# Altium footprint library EEE-FK0J331P.PcbLib: 3 footprints
Each footprint in its own frame and in the unit in brackets; x right, y up, seen from the top. Pads: shape width x height; smd on the part's side, far side on the other; paste and mask are expansions set on the pad; w line width, h text height; cw(c..) or ccw(c..) is an arc to the next point about the centre after c.
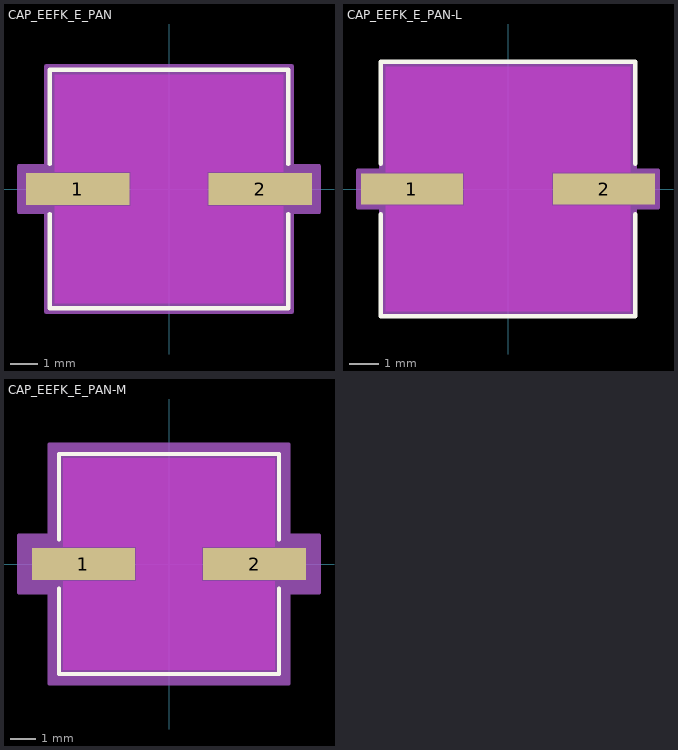
[diagram p0: the footprints below, top view; thin cyan lines are the x and y axes]

## CAP_EEFK_E_PAN [mil]
pads (2):
  rect 150x46 smd paste+0 mask+0: 1(-132,0) 2(132,0)
Top Layer keep-out:
  region: -165.5,-165.5 -165.5,-25 165.5,-25 165.5,-165.5
  region: -165.5,25 -165.5,165.5 165.5,165.5 165.5,25
  region: -55,-25 -55,25 55,25 55,-25
Top Overlay:
  lines w6: -172.5,-36.1 -172.5,-172.5 172.5,-172.5 172.5,-36.1 ; -172.5,36.1 -172.5,172.5 172.5,172.5 172.5,36.1
Keep-Out Layer:
  region: -55,-25 -55,25 55,25 55,-25
Mechanical 13:
  lines w1: -167.5,-83.75 -83.75,-167.5 ; -167.5,83.75 -83.75,167.5 ; -167.5,-167.5 -167.5,167.5 167.5,167.5 167.5,-167.5 -167.5,-167.5
Mechanical 15:
  region: -177.5,-33 -217,-33 -217,33 -177.5,33 -177.5,177.5 177.5,177.5 177.5,33 217,33 217,-33 177.5,-33 177.5,-177.5 -177.5,-177.5
  lines w6: -217,-33 -177.5,-33 -177.5,-177.5 177.5,-177.5 177.5,-33 217,-33 217,33 177.5,33 177.5,177.5 -177.5,177.5 -177.5,33 -217,33 -217,-33
3D body "CAP_EEFK_E_PAN.step": height 258.11, standoff 0, extent -187.01,-167.48 187.01,167.48

## CAP_EEFK_E_PAN-L [mil]
pads (2):
  rect 138x42 smd paste+0 mask+0: 1(-130,0) 2(130,0)
Top Layer keep-out:
  region: -59,-23 -59,23 59,23 59,-23
  region: -165.5,23 -165.5,165.5 165.5,165.5 165.5,23
  region: -165.5,-165.5 -165.5,-23 165.5,-23 165.5,-165.5
Top Overlay:
  lines w6: -172.5,-34.1 -172.5,-172.5 172.5,-172.5 172.5,-34.1 ; -172.5,34.1 -172.5,172.5 172.5,172.5 172.5,34.1
  text ".Designator" at -137.5,-25 h50
Keep-Out Layer:
  region: -59,-23 -59,23 59,23 59,-23
Mechanical 13:
  lines w1: -167.5,-83.75 -83.75,-167.5 ; -167.5,83.75 -83.75,167.5 ; -167.5,-167.5 167.5,-167.5 167.5,167.5 -167.5,167.5 -167.5,-167.5
  text ".Designator" at -137.5,-25 h50
Mechanical 15:
  region: -171.5,-25 -203,-25 -203,25 -171.5,25 -171.5,171.5 171.5,171.5 171.5,25 203,25 203,-25 171.5,-25 171.5,-171.5 -171.5,-171.5
  lines w6: -203,-25 -203,25 -171.5,25 -171.5,171.5 171.5,171.5 171.5,25 203,25 203,-25 171.5,-25 171.5,-171.5 -171.5,-171.5 -171.5,-25 -203,-25
3D body "CAP_EEFK_E_PAN.step": height 258.11, standoff 0, extent -187.01,-167.48 187.01,167.48

## CAP_EEFK_E_PAN-M [mil]
pads (2):
  rect 162x50 smd paste+0 mask+0: 1(-134,0) 2(134,0)
Top Layer keep-out:
  region: -51,-27 -51,27 51,27 51,-27
  region: -165.5,27 -165.5,165.5 165.5,165.5 165.5,27
  region: -165.5,-165.5 -165.5,-27 165.5,-27 165.5,-165.5
Top Overlay:
  lines w6: -172.5,-38.1 -172.5,-172.5 172.5,-172.5 172.5,-38.1 ; -172.5,38.1 -172.5,172.5 172.5,172.5 172.5,38.1
  text ".Designator" at -137.5,-25 h50
Keep-Out Layer:
  region: -51,-27 -51,27 51,27 51,-27
Mechanical 13:
  lines w1: -167.5,-83.75 -83.75,-167.5 ; -167.5,83.75 -83.75,167.5 ; -167.5,-167.5 167.5,-167.5 167.5,167.5 -167.5,167.5 -167.5,-167.5
  text ".Designator" at -137.5,-25 h50
Mechanical 15:
  region: -187.5,-45 -235,-45 -235,45 -187.5,45 -187.5,187.5 187.5,187.5 187.5,45 235,45 235,-45 187.5,-45 187.5,-187.5 -187.5,-187.5
  lines w6: -235,-45 -235,45 -187.5,45 -187.5,187.5 187.5,187.5 187.5,45 235,45 235,-45 187.5,-45 187.5,-187.5 -187.5,-187.5 -187.5,-45 -235,-45
3D body "CAP_EEFK_E_PAN.step": height 258.11, standoff 0, extent -187.01,-167.48 187.01,167.48